# Altium schematic symbol library ABLS-8.000MHZ-B2-T.SchLib: 1 symbol
Pins are listed as number, name and electrical type; pins without a type are passive.

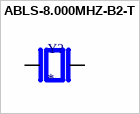
[diagram p0: symbol ABLS-8.000MHZ-B2-T]

## ABLS-8.000MHZ-B2-T
designator Y?
HC/49US (AT49) SMD LOW PROFILE CRYSTAL; MF: Abracon LLC; MP: ABLS-8.000MHZ-B2-T; SnapEDA_Link: https://www.snapeda.com/parts/ABLS-8.000MHZ-B2-T/Abracon/view-part/?ref=snap; Package: HC49/US Abracon; Value: *; Check_prices: https://www.snapeda.com/parts/ABLS-8.000MHZ-B2-T/Abracon/view-part/?ref=eda
footprint XTAL_ABLS-8.000MHZ-B2-T
pins: 1, 2